# Altium footprint library WR-BHD.PcbLib: 220 footprints (part 4 of 14)
Each footprint in its own frame and in the unit in brackets; x right, y up, seen from the top. Pads: shape width x height; smd on the part's side, far side on the other; paste and mask are expansions set on the pad; w line width, h text height; cw(c..) or ccw(c..) is an arc to the next point about the centre after c.
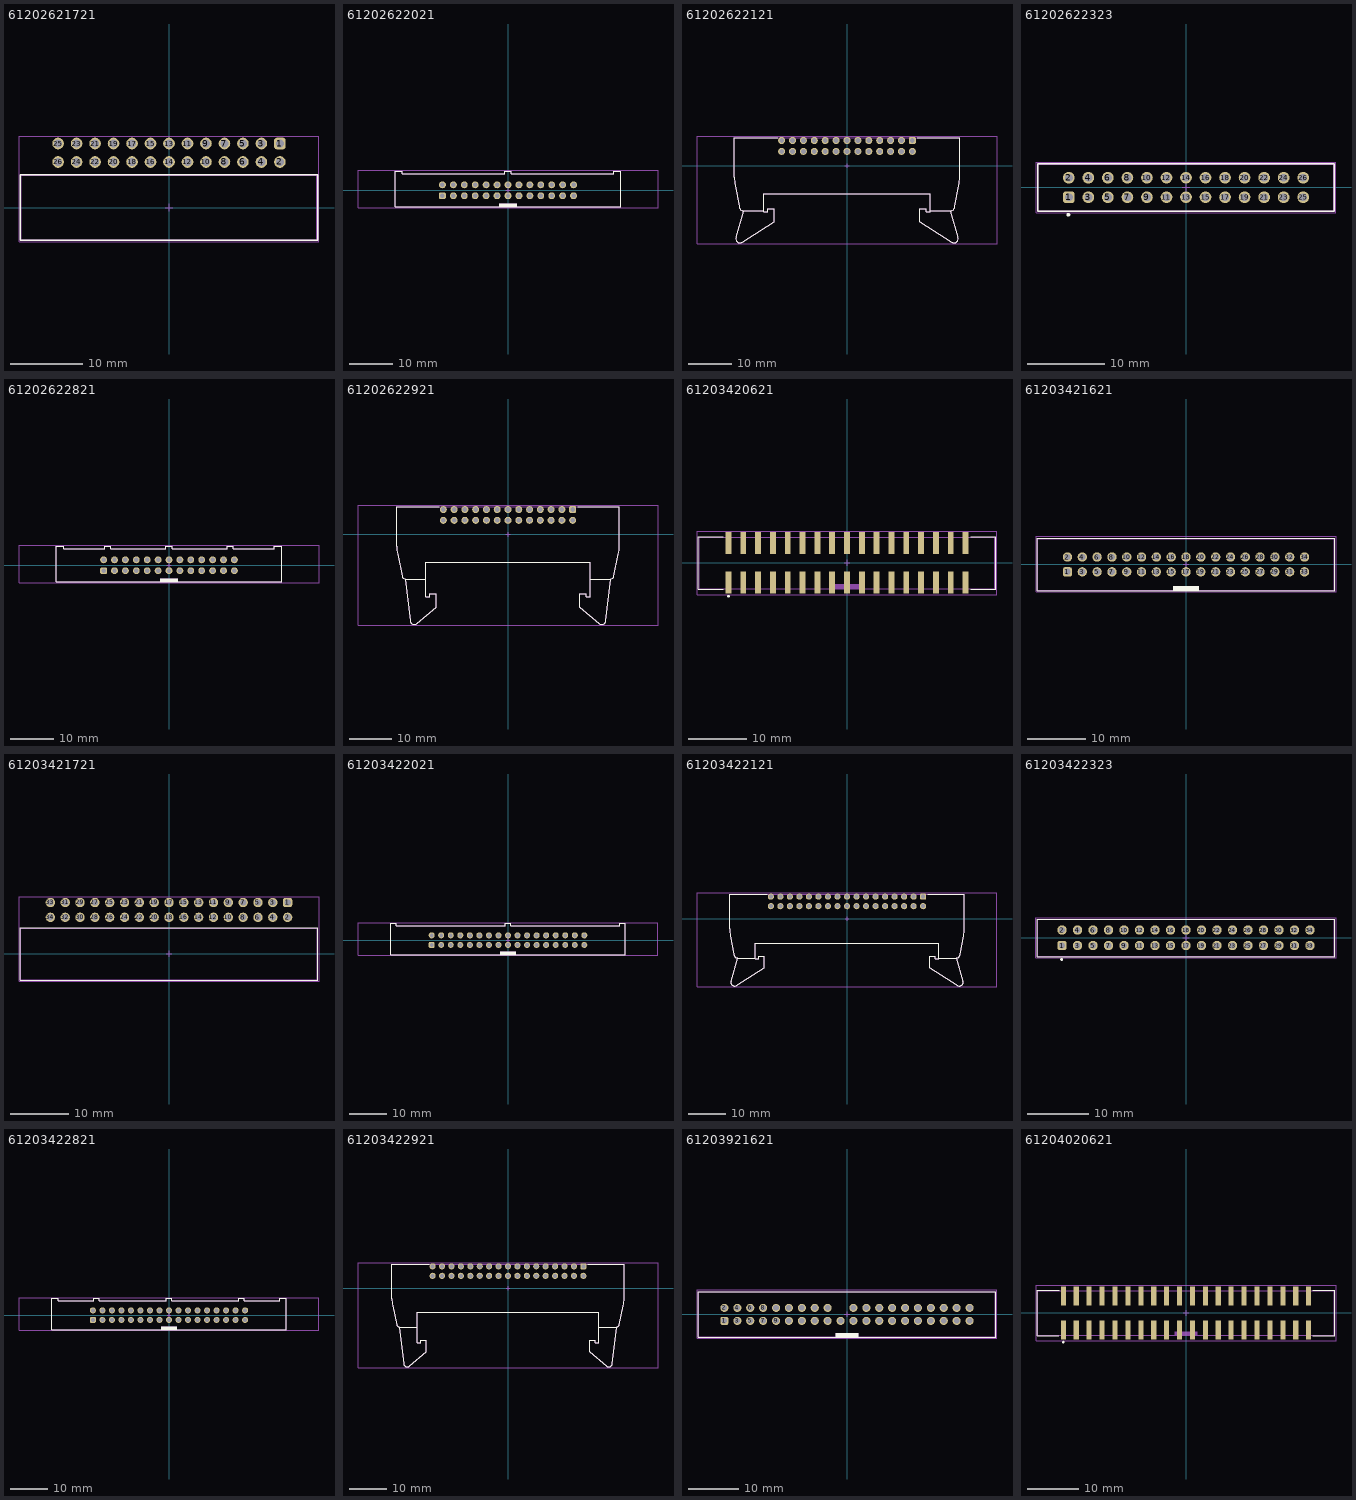
[diagram p3: the footprints below, top view; thin cyan lines are the x and y axes]

## 61202621721 [mm] "26 pins, right angled, gold plating"
height 9.1
pads (26):
  rrect50% 1.6x1.6 hole 1.1: 1(15.24,8.805)
  round 1.6 hole 1.1: 2(15.24,6.265) 3(12.7,8.805) 4(12.7,6.265) 5(10.16,8.805) 6(10.16,6.265) 7(7.62,8.805) 8(7.62,6.265) 9(5.08,8.805) 10(5.08,6.265) 11(2.54,8.805) 12(2.54,6.265) 13(0,8.805) 14(0,6.265) 15(-2.54,8.805) 16(-2.54,6.265) 17(-5.08,8.805) 18(-5.08,6.265) 19(-7.62,8.805) 20(-7.62,6.265) 21(-10.16,8.805) 22(-10.16,6.265) 23(-12.7,8.805) 24(-12.7,6.265) 25(-15.24,8.805) 26(-15.24,6.265)
Top Overlay:
  lines w0.2: -20.415,-4.5 20.415,-4.5 20.415,4.5 -20.415,4.5 -20.415,-4.5
Top Assembly:
  lines w0.1: -20.34,-4.425 20.34,-4.425 20.34,4.425 -20.34,4.425 -20.34,-4.425
Top Designator:
  text ".Designator" at -3.647,-0.357 h1
Top 3D Body:
  lines w0.1: -20.34,-4.425 -20.34,4.425 20.34,4.425 20.34,-4.425 -20.34,-4.425
Top Courtyard:
  lines w0.05: -20.615,-4.7 -20.615,9.805 20.615,9.805 20.615,-4.7 -20.615,-4.7
Top Component Center:
  lines w0.1: -0.5,0 0.5,0 ; 0,-0.5 0,0.5
3D body "61202621721.stp": height 9.23, standoff -2.88, extent -20.34,-4.425 20.34,9.125

## 61202622021 [mm] "26 pins, straight, short lever, gold plating"
height 24.5
pads (26):
  rrect50% 1.6x1.6 hole 1.02: 1(-15.24,-1.27)
  round 1.6 hole 1.02: 2(-15.24,1.27) 3(-12.7,-1.27) 4(-12.7,1.27) 5(-10.16,-1.27) 6(-10.16,1.27) 7(-7.62,-1.27) 8(-7.62,1.27) 9(-5.08,-1.27) 10(-5.08,1.27) 11(-2.54,-1.27) 12(-2.54,1.27) 13(0,-1.27) 14(0,1.27) 15(2.54,-1.27) 16(2.54,1.27) 17(5.08,-1.27) 18(5.08,1.27) 19(7.62,-1.27) 20(7.62,1.27) 21(10.16,-1.27) 22(10.16,1.27) 23(12.7,-1.27) 24(12.7,1.27) 25(15.24,-1.27) 26(15.24,1.27)
Top Overlay:
  rectangle: -2.1,-3.85 2.1,-3.05
  lines w0.2: -0.7,4.45 0.7,4.45 0.7,3.85 24.61,3.85 24.61,4.45 26.16,4.45 26.16,-3.85 -26.16,-3.85 -26.16,4.45 -24.61,4.45 -24.61,3.85 -0.7,3.85 -0.7,4.45 ; -0.7,4.45 -0.7,4.45
Top Assembly:
  rectangle: -2.1,-3.85 2.1,-3.05
  lines w0.1: -0.7,4.45 -0.7,3.85 -24.61,3.85 -24.61,4.45 -26.16,4.45 -26.16,-3.85 26.16,-3.85 26.16,4.45 24.61,4.45 24.61,3.85 0.7,3.85 0.7,4.45 -0.7,4.45 ; -0.7,4.45 -0.7,4.45
Top Designator:
  text ".Designator" at -3.647,-0.357 h1
Top 3D Body:
  rectangle: -2.1,-3.85 2.1,-3.05
  lines w0.1: -0.7,4.45 0.7,4.45 0.7,3.85 24.61,3.85 24.61,4.45 26.16,4.45 26.16,-3.85 -26.16,-3.85 -26.16,4.45 -24.61,4.45 -24.61,3.85 -0.7,3.85 -0.7,4.45 ; -0.7,4.45 -0.7,4.45
Top Courtyard:
  lines w0.05: -34.86,-4.05 -34.86,4.65 34.86,4.65 34.86,-4.05 -34.86,-4.05
Top Component Center:
  lines w0.1: -0.5,0 0.5,0 ; 0,-0.5 0,0.5
3D body "61202622021.stp": height 24.55, standoff -3.35, extent -26.259,-3.849 26.261,4.451

## 61202622121 [mm] "26 pins, right angeled, short lever, gold plating"
height 8.3
pads (26):
  rrect50% 1.65x1.65 hole 1.1: 1(15.24,5.88)
  round 1.65 hole 1.1: 2(15.24,3.34) 3(12.7,5.88) 4(12.7,3.34) 5(10.16,5.88) 6(10.16,3.34) 7(7.62,5.88) 8(7.62,3.34) 9(5.08,5.88) 10(5.08,3.34) 11(2.54,5.88) 12(2.54,3.34) 13(0,5.88) 14(0,3.34) 15(-2.54,5.88) 16(-2.54,3.34) 17(-5.08,5.88) 18(-5.08,3.34) 19(-7.62,5.88) 20(-7.62,3.34) 21(-10.16,5.88) 22(-10.16,3.34) 23(-12.7,5.88) 24(-12.7,3.34) 25(-15.24,5.88) 26(-15.24,3.34)
Top Overlay:
  lines w0.2: -25.124,-9.501 -26.066,-4.611 cw(c-16.26,-2.65) -26.26,-2.65 -26.26,6.5 -16.16,6.5 ; -25.12,-9.5 ccw(c-24.12,-9.5) -24.12,-10.5 ; -24.215,-10.5 -19.46,-10.5 ; -24.034,-10.601 -25.867,-16.691 ccw(c-24.91,-16.98) -24.36,-17.815 -16.96,-13.08 -16.96,-9.98 -18.46,-9.98 -18.46,-10.69 -19.46,-10.69 -19.46,-6.5 19.46,-6.5 19.46,-10.69 18.46,-10.69 18.46,-9.98 16.96,-9.98 16.96,-13.08 24.36,-17.816 ccw(c24.91,-16.98) 25.867,-16.691 24.034,-10.601 ; 16.41,6.5 26.26,6.5 26.26,-2.65 cw(c16.26,-2.65) 26.066,-4.611 25.124,-9.501 ; 19.46,-10.5 24.215,-10.5 ; 24.12,-10.5 ccw(c24.12,-9.5) 25.12,-9.5
Top Assembly:
  lines w0.1: -25.124,-9.501 -26.066,-4.611 cw(c-16.26,-2.65) -26.26,-2.65 -26.26,6.5 26.26,6.5 26.26,-2.65 cw(c16.26,-2.65) 26.066,-4.611 25.124,-9.501 ; -25.12,-9.5 ccw(c-24.12,-9.5) -24.12,-10.5 ; -24.215,-10.5 -19.46,-10.5 ; -24.034,-10.601 -25.867,-16.691 ccw(c-24.91,-16.98) -24.36,-17.815 -16.96,-13.08 -16.96,-9.98 -18.46,-9.98 -18.46,-10.69 -19.46,-10.69 -19.46,-6.5 19.46,-6.5 19.46,-10.69 18.46,-10.69 18.46,-9.98 16.96,-9.98 16.96,-13.08 24.36,-17.816 ccw(c24.91,-16.98) 25.867,-16.691 24.034,-10.601 ; 19.46,-10.5 24.215,-10.5 ; 24.12,-10.5 ccw(c24.12,-9.5) 25.12,-9.5
Top Designator:
  text ".Designator" at -3.647,-0.357 h1
Top 3D Body:
  lines w0.1: -25.124,-9.501 -26.066,-4.611 cw(c-16.26,-2.65) -26.26,-2.65 -26.26,6.5 26.26,6.5 26.26,-2.65 cw(c16.26,-2.65) 26.066,-4.611 25.124,-9.501 ; -25.12,-9.5 ccw(c-24.12,-9.5) -24.12,-10.5 ; -24.215,-10.5 -19.46,-10.5 ; -24.034,-10.601 -25.867,-16.691 ccw(c-24.91,-16.98) -24.36,-17.815 -16.96,-13.08 -16.96,-9.98 -18.46,-9.98 -18.46,-10.69 -19.46,-10.69 -19.46,-6.5 19.46,-6.5 19.46,-10.69 18.46,-10.69 18.46,-9.98 16.96,-9.98 16.96,-13.08 24.36,-17.816 ccw(c24.91,-16.98) 25.867,-16.691 24.034,-10.601 ; 19.46,-10.5 24.215,-10.5 ; 24.12,-10.5 ccw(c24.12,-9.5) 25.12,-9.5
Top Courtyard:
  lines w0.05: -34.96,-18.2 -34.96,6.88 34.96,6.88 34.96,-18.2 -34.96,-18.2
Top Component Center:
  lines w0.1: -0.5,0 0.5,0 ; 0,-0.5 0,0.5
3D body "61202622121.stp": height 8.35, standoff -3.35, extent -26.26,-18 26.26,6.5

## 61202622323 [mm] "26 pins, selective gold plating"
height 7.3
pads (26):
  rrect50% 1.52x1.52 hole 1.02: 1(-15.24,-1.27)
  round 1.52 hole 1.02: 2(-15.24,1.27) 3(-12.7,-1.27) 4(-12.7,1.27) 5(-10.16,-1.27) 6(-10.16,1.27) 7(-7.62,-1.27) 8(-7.62,1.27) 9(-5.08,-1.27) 10(-5.08,1.27) 11(-2.54,-1.27) 12(-2.54,1.27) 13(0,-1.27) 14(0,1.27) 15(2.54,-1.27) 16(2.54,1.27) 17(5.08,-1.27) 18(5.08,1.27) 19(7.62,-1.27) 20(7.62,1.27) 21(10.16,-1.27) 22(10.16,1.27) 23(12.7,-1.27) 24(12.7,1.27) 25(15.24,-1.27) 26(15.24,1.27)
Top Overlay:
  circle w0.25: c-15.3,-3.55 r0.125
  lines w0.2: -19.31,-3.075 19.31,-3.075 19.31,3.075 -19.31,3.075 -19.31,-3.075
Top Assembly:
  lines w0.1: -19.235,-3 -19.235,3 19.235,3 19.235,-3 -19.235,-3
Top Designator:
  text ".Designator" at -3.647,-0.357 h1
Top 3D Body:
  lines w0.1: -19.235,-3 19.235,-3 19.235,3 -19.235,3 -19.235,-3
Top Courtyard:
  lines w0.05: -19.51,-3.275 19.51,-3.275 19.51,3.275 -19.51,3.275 -19.51,-3.275
Top Component Center:
  lines w0.1: -0.5,0 0.5,0 ; 0,-0.5 0,0.5
3D body "61202622323.stp": height 9.33, standoff -3.27, extent -19.235,-3 19.235,3

## 61202622821 [mm] "26 pins, straight, long lever, gold plating"
height 28
pads (26):
  rrect50% 1.6x1.6 hole 1.02: 1(-15.24,-1.27)
  round 1.6 hole 1.02: 2(-15.24,1.27) 3(-12.7,-1.27) 4(-12.7,1.27) 5(-10.16,-1.27) 6(-10.16,1.27) 7(-7.62,-1.27) 8(-7.62,1.27) 9(-5.08,-1.27) 10(-5.08,1.27) 11(-2.54,-1.27) 12(-2.54,1.27) 13(0,-1.27) 14(0,1.27) 15(2.54,-1.27) 16(2.54,1.27) 17(5.08,-1.27) 18(5.08,1.27) 19(7.62,-1.27) 20(7.62,1.27) 21(10.16,-1.27) 22(10.16,1.27) 23(12.7,-1.27) 24(12.7,1.27) 25(15.24,-1.27) 26(15.24,1.27)
Top Overlay:
  rectangle: -2.1,-3.85 2.1,-3.04
  lines w0.2: -26.26,-3.85 26.26,-3.85 26.26,4.45 24.53,4.45 24.53,3.85 14.96,3.85 14.96,4.45 13.56,4.45 13.56,3.85 0.7,3.85 0.7,4.45 -0.7,4.45 -0.7,3.85 -13.56,3.85 -13.56,4.45 -14.96,4.45 -14.96,3.85 -24.53,3.85 -24.53,4.45 -26.26,4.45 -26.26,-3.85
Top Assembly:
  rectangle: -2.1,-3.85 2.1,-3.04
  lines w0.1: -26.26,-3.85 -26.26,4.45 -24.53,4.45 -24.53,3.85 -14.96,3.85 -14.96,4.45 -13.56,4.45 -13.56,3.85 -0.7,3.85 -0.7,4.45 0.7,4.45 0.7,3.85 13.56,3.85 13.56,4.45 14.96,4.45 14.96,3.85 24.53,3.85 24.53,4.45 26.26,4.45 26.26,-3.85 -26.26,-3.85
Top Designator:
  text ".Designator" at -3.647,-0.357 h1
Top 3D Body:
  rectangle: -2.1,-3.85 2.1,-3.04
  lines w0.1: -26.26,-3.85 26.26,-3.85 26.26,4.45 24.53,4.45 24.53,3.85 14.96,3.85 14.96,4.45 13.56,4.45 13.56,3.85 0.7,3.85 0.7,4.45 -0.7,4.45 -0.7,3.85 -13.56,3.85 -13.56,4.45 -14.96,4.45 -14.96,3.85 -24.53,3.85 -24.53,4.45 -26.26,4.45 -26.26,-3.85
Top Courtyard:
  lines w0.05: -34.96,-4.05 -34.96,4.65 34.96,4.65 34.96,-4.05 -34.96,-4.05
Top Component Center:
  lines w0.1: -0.5,0 0.5,0 ; 0,-0.5 0,0.5
3D body "61202622821 (rev1).stp": height 27.84, standoff -3.35, extent -26.26,-3.86 26.26,4.45

## 61202622921 [mm] "26 pins, right angeled, long lever, gold plating"
height 10.8
pads (26):
  rrect50% 1.65x1.65 hole 1.1: 1(15.24,5.88)
  round 1.65 hole 1.1: 2(15.24,3.34) 3(12.7,5.88) 4(12.7,3.34) 5(10.16,5.88) 6(10.16,3.34) 7(7.62,5.88) 8(7.62,3.34) 9(5.08,5.88) 10(5.08,3.34) 11(2.54,5.88) 12(2.54,3.34) 13(0,5.88) 14(0,3.34) 15(-2.54,5.88) 16(-2.54,3.34) 17(-5.08,5.88) 18(-5.08,3.34) 19(-7.62,5.88) 20(-7.62,3.34) 21(-10.16,5.88) 22(-10.16,3.34) 23(-12.7,5.88) 24(-12.7,3.34) 25(-15.24,5.88) 26(-15.24,3.34)
Top Overlay:
  lines w0.2: -26.26,-2.81 -26.26,6.5 -16.21,6.5 ; -26.256,-2.81 ccw(c-16.26,-2.51) -26.014,-4.714 -24.969,-9.884 ; -24.964,-9.883 ccw(c-24.04,-9.5) -24.04,-10.5 -19.36,-10.5 ; -24.224,-10.5 -23.078,-20.372 ccw(c-22.09,-20.22) -21.432,-20.973 -16.961,-17.109 ; -16.96,-17.11 -16.96,-14.01 -18.46,-14.01 -18.46,-14.72 -19.36,-14.72 -19.36,-6.5 19.36,-6.5 19.36,-14.72 18.46,-14.72 18.46,-14.01 16.96,-14.01 16.96,-17.11 ; 16.41,6.5 26.26,6.5 26.26,-2.81 ; 16.961,-17.109 21.432,-20.973 ccw(c22.09,-20.22) 23.078,-20.372 24.224,-10.5 ; 19.36,-10.5 24.04,-10.5 ccw(c24.04,-9.5) 24.964,-9.883 ; 24.969,-9.884 26.014,-4.714 ccw(c16.26,-2.51) 26.256,-2.81
Top Assembly:
  lines w0.1: -26.26,-2.81 -26.26,6.5 26.26,6.5 26.26,-2.81 ; -26.256,-2.81 ccw(c-16.26,-2.51) -26.014,-4.714 -24.969,-9.884 ; -24.964,-9.883 ccw(c-24.04,-9.5) -24.04,-10.5 -19.36,-10.5 ; -24.224,-10.5 -23.078,-20.372 ccw(c-22.09,-20.22) -21.432,-20.973 -16.961,-17.109 ; -16.96,-17.11 -16.96,-14.01 -18.46,-14.01 -18.46,-14.72 -19.36,-14.72 -19.36,-6.5 19.36,-6.5 19.36,-14.72 18.46,-14.72 18.46,-14.01 16.96,-14.01 16.96,-17.11 ; 16.961,-17.109 21.432,-20.973 ccw(c22.09,-20.22) 23.078,-20.372 24.224,-10.5 ; 19.36,-10.5 24.04,-10.5 ccw(c24.04,-9.5) 24.964,-9.883 ; 24.969,-9.884 26.014,-4.714 ccw(c16.26,-2.51) 26.256,-2.81
Top Designator:
  text ".Designator" at -3.647,-0.357 h1
Top 3D Body:
  lines w0.1: -26.26,-2.81 -26.26,6.5 26.26,6.5 26.26,-2.81 ; -26.256,-2.81 ccw(c-16.26,-2.51) -26.014,-4.714 -24.969,-9.884 ; -24.964,-9.883 ccw(c-24.04,-9.5) -24.04,-10.5 -19.36,-10.5 ; -24.224,-10.5 -23.078,-20.372 ccw(c-22.09,-20.22) -21.432,-20.973 -16.961,-17.109 ; -16.96,-17.11 -16.96,-14.01 -18.46,-14.01 -18.46,-14.72 -19.36,-14.72 -19.36,-6.5 19.36,-6.5 19.36,-14.72 18.46,-14.72 18.46,-14.01 16.96,-14.01 16.96,-17.11 ; 16.961,-17.109 21.432,-20.973 ccw(c22.09,-20.22) 23.078,-20.372 24.224,-10.5 ; 19.36,-10.5 24.04,-10.5 ccw(c24.04,-9.5) 24.964,-9.883 ; 24.969,-9.884 26.014,-4.714 ccw(c16.26,-2.51) 26.256,-2.81
Top Courtyard:
  lines w0.05: -35.36,-21.41 -35.36,6.88 35.36,6.88 35.36,-21.41 -35.36,-21.41
Top Component Center:
  lines w0.1: -0.5,0 0.5,0 ; 0,-0.5 0,0.5
3D body "61202622921 (rev1).stp": height 8.35, standoff -2.35, extent -26.26,-21.221 26.26,6.5

## 61203420621 [mm] "34 pins, SMT, straight, gold plating"
height 9.2
pads (34):
  rect 1x3.75 smd: 1(-20.32,-3.375) 2(-20.32,3.375) 3(-17.78,-3.375) 4(-17.78,3.375) 5(-15.24,-3.375) 6(-15.24,3.375) 7(-12.7,-3.375) 8(-12.7,3.375) 9(-10.16,-3.375) 10(-10.16,3.375) 11(-7.62,-3.375) 12(-7.62,3.375) 13(-5.08,-3.375) 14(-5.08,3.375) 15(-2.54,-3.375) 16(-2.54,3.375) 17(0,-3.375) 18(0,3.375) 19(2.54,-3.375) 20(2.54,3.375) 21(5.08,-3.375) 22(5.08,3.375) 23(7.62,-3.375) 24(7.62,3.375) 25(10.16,-3.375) 26(10.16,3.375) 27(12.7,-3.375) 28(12.7,3.375) 29(15.24,-3.375) 30(15.24,3.375) 31(17.78,-3.375) 32(17.78,3.375) 33(20.32,-3.375) 34(20.32,3.375)
Top Overlay:
  circle w0.25: c-20.32,-5.725 r0.125
  lines w0.2: -21.21,-4.5 -25.49,-4.5 -25.49,4.5 -21.16,4.5 ; 21.16,-4.5 25.49,-4.5 25.49,4.5 21.16,4.5
Top Assembly:
  rectangle: -2.25,-4.4 2.25,-3.6
  lines w0.1: -25.34,-4.4 -25.34,4.4 25.34,4.4 25.34,-4.4 -25.34,-4.4
Top Designator:
  text ".Designator" at -3.647,-0.357 h1
Top 3D Body:
  rectangle: -2.25,-4.4 2.25,-3.6
  lines w0.1: -25.34,-4.4 25.34,-4.4 25.34,4.4 -25.34,4.4 -25.34,-4.4
Top Courtyard:
  lines w0.05: -25.69,-5.45 25.69,-5.45 25.69,5.45 -25.69,5.45 -25.69,-5.45
Top Component Center:
  lines w0.1: -0.5,0 0.5,0 ; 0,-0.5 0,0.5
3D body "61203420621.stp": height 10.2, standoff 0.01, extent -25.4,-4.75 25.4,4.75

## 61203421621 [mm] "34 pins, straight, gold plating"
height 9.1
pads (34):
  rrect50% 1.6x1.6 hole 1.1: 1(-20.32,-1.27)
  round 1.6 hole 1.1: 2(-20.32,1.27) 3(-17.78,-1.27) 4(-17.78,1.27) 5(-15.24,-1.27) 6(-15.24,1.27) 7(-12.7,-1.27) 8(-12.7,1.27) 9(-10.16,-1.27) 10(-10.16,1.27) 11(-7.62,-1.27) 12(-7.62,1.27) 13(-5.08,-1.27) 14(-5.08,1.27) 15(-2.54,-1.27) 16(-2.54,1.27) 17(0,-1.27) 18(0,1.27) 19(2.54,-1.27) 20(2.54,1.27) 21(5.08,-1.27) 22(5.08,1.27) 23(7.62,-1.27) 24(7.62,1.27) 25(10.16,-1.27) 26(10.16,1.27) 27(12.7,-1.27) 28(12.7,1.27) 29(15.24,-1.27) 30(15.24,1.27) 31(17.78,-1.27) 32(17.78,1.27) 33(20.32,-1.27) 34(20.32,1.27)
Top Overlay:
  rectangle: -2.25,-4.5 2.25,-3.7
  lines w0.2: -25.52,-4.5 -25.52,4.5 25.52,4.5 25.52,-4.5 -25.52,-4.5
Top Assembly:
  rectangle: -2.25,-4.425 2.25,-3.7
  lines w0.1: -25.42,-4.425 25.42,-4.425 25.42,4.425 -25.42,4.425 -25.42,-4.425
Top Designator:
  text ".Designator" at -3.647,-0.357 h1
Top 3D Body:
  rectangle: -2.25,-4.425 2.25,-3.7
  lines w0.1: -25.42,-4.425 -25.42,4.425 25.42,4.425 25.42,-4.425 -25.42,-4.425
Top Courtyard:
  lines w0.05: -25.72,-4.7 -25.72,4.85 25.72,4.85 25.72,-4.7 -25.72,-4.7
Top Component Center:
  lines w0.1: -0.5,0 0.5,0 ; 0,-0.5 0,0.5
3D body "61203421621.stp": height 9.13, standoff -2.98, extent -25.42,-4.425 25.42,4.75

## 61203421721 [mm] "34 pins, right angled, gold plating"
height 9.1
pads (34):
  rrect50% 1.6x1.6 hole 1.1: 1(20.32,8.805)
  round 1.6 hole 1.1: 2(20.32,6.265) 3(17.78,8.805) 4(17.78,6.265) 5(15.24,8.805) 6(15.24,6.265) 7(12.7,8.805) 8(12.7,6.265) 9(10.16,8.805) 10(10.16,6.265) 11(7.62,8.805) 12(7.62,6.265) 13(5.08,8.805) 14(5.08,6.265) 15(2.54,8.805) 16(2.54,6.265) 17(0,8.805) 18(0,6.265) 19(-2.54,8.805) 20(-2.54,6.265) 21(-5.08,8.805) 22(-5.08,6.265) 23(-7.62,8.805) 24(-7.62,6.265) 25(-10.16,8.805) 26(-10.16,6.265) 27(-12.7,8.805) 28(-12.7,6.265) 29(-15.24,8.805) 30(-15.24,6.265) 31(-17.78,8.805) 32(-17.78,6.265) 33(-20.32,8.805) 34(-20.32,6.265)
Top Overlay:
  lines w0.2: -25.495,-4.5 -25.495,4.5 25.495,4.5 25.495,-4.5 -25.495,-4.5
Top Assembly:
  lines w0.1: -25.42,-4.425 -25.42,4.425 25.42,4.425 25.42,-4.425 -25.42,-4.425
Top Designator:
  text ".Designator" at -3.647,-0.357 h1
Top 3D Body:
  lines w0.1: -25.42,-4.425 25.42,-4.425 25.42,4.425 -25.42,4.425 -25.42,-4.425
Top Courtyard:
  lines w0.05: -25.695,-4.7 25.695,-4.7 25.695,9.805 -25.695,9.805 -25.695,-4.7
Top Component Center:
  lines w0.1: -0.5,0 0.5,0 ; 0,-0.5 0,0.5
3D body "61203421721.stp": height 9.23, standoff -2.88, extent -25.42,-4.425 25.42,9.125

## 61203422021 [mm] "34 pins, straight, short lever, gold plating"
height 24.5
pads (34):
  rrect50% 1.6x1.6 hole 1.02: 1(-20.32,-1.27)
  round 1.6 hole 1.02: 2(-20.32,1.27) 3(-17.78,-1.27) 4(-17.78,1.27) 5(-15.24,-1.27) 6(-15.24,1.27) 7(-12.7,-1.27) 8(-12.7,1.27) 9(-10.16,-1.27) 10(-10.16,1.27) 11(-7.62,-1.27) 12(-7.62,1.27) 13(-5.08,-1.27) 14(-5.08,1.27) 15(-2.54,-1.27) 16(-2.54,1.27) 17(0,-1.27) 18(0,1.27) 19(2.54,-1.27) 20(2.54,1.27) 21(5.08,-1.27) 22(5.08,1.27) 23(7.62,-1.27) 24(7.62,1.27) 25(10.16,-1.27) 26(10.16,1.27) 27(12.7,-1.27) 28(12.7,1.27) 29(15.24,-1.27) 30(15.24,1.27) 31(17.78,-1.27) 32(17.78,1.27) 33(20.32,-1.27) 34(20.32,1.27)
Top Overlay:
  rectangle: -2.1,-3.85 2.1,-3.05
  lines w0.2: -0.7,4.45 0.7,4.45 0.7,3.85 29.69,3.85 29.69,4.45 31.24,4.45 31.24,-3.85 -31.24,-3.85 -31.24,4.45 -29.69,4.45 -29.69,3.85 -0.7,3.85 -0.7,4.45 ; -0.7,4.45 -0.7,4.45
Top Assembly:
  rectangle: -2.1,-3.85 2.1,-3.05
  lines w0.1: -0.7,4.45 -0.7,3.85 -29.69,3.85 -29.69,4.45 -31.24,4.45 -31.24,-3.85 31.24,-3.85 31.24,4.45 29.69,4.45 29.69,3.85 0.7,3.85 0.7,4.45 -0.7,4.45 ; -0.7,4.45 -0.7,4.45
Top Designator:
  text ".Designator" at -3.647,-0.357 h1
Top 3D Body:
  rectangle: -2.1,-3.85 2.1,-3.05
  lines w0.1: -0.7,4.45 0.7,4.45 0.7,3.85 29.69,3.85 29.69,4.45 31.24,4.45 31.24,-3.85 -31.24,-3.85 -31.24,4.45 -29.69,4.45 -29.69,3.85 -0.7,3.85 -0.7,4.45 ; -0.7,4.45 -0.7,4.45
Top Courtyard:
  lines w0.05: -39.94,-4.05 -39.94,4.65 39.94,4.65 39.94,-4.05 -39.94,-4.05
Top Component Center:
  lines w0.1: -0.5,0 0.5,0 ; 0,-0.5 0,0.5
3D body "61203422021.stp": height 24.55, standoff -3.35, extent -31.34,-3.85 31.34,4.45

## 61203422121 [mm] "34 pins, right angeled, short lever, gold plating"
height 8.3
pads (34):
  rrect50% 1.65x1.65 hole 1.1: 1(20.32,5.88)
  round 1.65 hole 1.1: 2(20.32,3.34) 3(17.78,5.88) 4(17.78,3.34) 5(15.24,5.88) 6(15.24,3.34) 7(12.7,5.88) 8(12.7,3.34) 9(10.16,5.88) 10(10.16,3.34) 11(7.62,5.88) 12(7.62,3.34) 13(5.08,5.88) 14(5.08,3.34) 15(2.54,5.88) 16(2.54,3.34) 17(0,5.88) 18(0,3.34) 19(-2.54,5.88) 20(-2.54,3.34) 21(-5.08,5.88) 22(-5.08,3.34) 23(-7.62,5.88) 24(-7.62,3.34) 25(-10.16,5.88) 26(-10.16,3.34) 27(-12.7,5.88) 28(-12.7,3.34) 29(-15.24,5.88) 30(-15.24,3.34) 31(-17.78,5.88) 32(-17.78,3.34) 33(-20.32,5.88) 34(-20.32,3.34)
Top Overlay:
  lines w0.2: -30.204,-9.501 -31.146,-4.611 cw(c-21.34,-2.65) -31.34,-2.65 -31.34,6.5 -21.24,6.5 ; -30.2,-9.5 ccw(c-29.2,-9.5) -29.2,-10.5 ; -29.295,-10.5 -24.54,-10.5 ; -29.114,-10.601 -30.947,-16.691 ccw(c-29.99,-16.98) -29.44,-17.815 -22.04,-13.08 -22.04,-9.98 -23.54,-9.98 -23.54,-10.69 -24.54,-10.69 -24.54,-6.5 24.54,-6.5 24.54,-10.69 23.54,-10.69 23.54,-9.98 22.04,-9.98 22.04,-13.08 29.44,-17.816 ccw(c29.99,-16.98) 30.947,-16.691 29.114,-10.601 ; 21.49,6.5 31.34,6.5 31.34,-2.65 cw(c21.34,-2.65) 31.146,-4.611 30.204,-9.501 ; 24.54,-10.5 29.295,-10.5 ; 29.2,-10.5 ccw(c29.2,-9.5) 30.2,-9.5
Top Assembly:
  lines w0.1: -30.204,-9.501 -31.146,-4.611 cw(c-21.34,-2.65) -31.34,-2.65 -31.34,6.5 31.34,6.5 31.34,-2.65 cw(c21.34,-2.65) 31.146,-4.611 30.204,-9.501 ; -30.2,-9.5 ccw(c-29.2,-9.5) -29.2,-10.5 ; -29.295,-10.5 -24.54,-10.5 ; -29.114,-10.601 -30.947,-16.691 ccw(c-29.99,-16.98) -29.44,-17.815 -22.04,-13.08 -22.04,-9.98 -23.54,-9.98 -23.54,-10.69 -24.54,-10.69 -24.54,-6.5 24.54,-6.5 24.54,-10.69 23.54,-10.69 23.54,-9.98 22.04,-9.98 22.04,-13.08 29.44,-17.816 ccw(c29.99,-16.98) 30.947,-16.691 29.114,-10.601 ; 24.54,-10.5 29.295,-10.5 ; 29.2,-10.5 ccw(c29.2,-9.5) 30.2,-9.5
Top Designator:
  text ".Designator" at -3.647,-0.357 h1
Top 3D Body:
  lines w0.1: -30.204,-9.501 -31.146,-4.611 cw(c-21.34,-2.65) -31.34,-2.65 -31.34,6.5 31.34,6.5 31.34,-2.65 cw(c21.34,-2.65) 31.146,-4.611 30.204,-9.501 ; -30.2,-9.5 ccw(c-29.2,-9.5) -29.2,-10.5 ; -29.295,-10.5 -24.54,-10.5 ; -29.114,-10.601 -30.947,-16.691 ccw(c-29.99,-16.98) -29.44,-17.815 -22.04,-13.08 -22.04,-9.98 -23.54,-9.98 -23.54,-10.69 -24.54,-10.69 -24.54,-6.5 24.54,-6.5 24.54,-10.69 23.54,-10.69 23.54,-9.98 22.04,-9.98 22.04,-13.08 29.44,-17.816 ccw(c29.99,-16.98) 30.947,-16.691 29.114,-10.601 ; 24.54,-10.5 29.295,-10.5 ; 29.2,-10.5 ccw(c29.2,-9.5) 30.2,-9.5
Top Courtyard:
  lines w0.05: -40.04,-18.2 -40.04,6.88 40.04,6.88 40.04,-18.2 -40.04,-18.2
Top Component Center:
  lines w0.1: -0.5,0 0.5,0 ; 0,-0.5 0,0.5
3D body "61203422121.stp": height 8.35, standoff -3.35, extent -31.34,-18 31.34,6.5

## 61203422323 [mm] "34 pins, selective gold plating"
height 7.3
pads (34):
  rrect50% 1.52x1.52 hole 1.02: 1(-20.32,-1.27)
  round 1.52 hole 1.02: 2(-20.32,1.27) 3(-17.78,-1.27) 4(-17.78,1.27) 5(-15.24,-1.27) 6(-15.24,1.27) 7(-12.7,-1.27) 8(-12.7,1.27) 9(-10.16,-1.27) 10(-10.16,1.27) 11(-7.62,-1.27) 12(-7.62,1.27) 13(-5.08,-1.27) 14(-5.08,1.27) 15(-2.54,-1.27) 16(-2.54,1.27) 17(0,-1.27) 18(0,1.27) 19(2.54,-1.27) 20(2.54,1.27) 21(5.08,-1.27) 22(5.08,1.27) 23(7.62,-1.27) 24(7.62,1.27) 25(10.16,-1.27) 26(10.16,1.27) 27(12.7,-1.27) 28(12.7,1.27) 29(15.24,-1.27) 30(15.24,1.27) 31(17.78,-1.27) 32(17.78,1.27) 33(20.32,-1.27) 34(20.32,1.27)
Top Overlay:
  circle w0.25: c-20.38,-3.55 r0.125
  lines w0.2: -24.39,-3.075 -24.39,3.075 24.39,3.075 24.39,-3.075 -24.39,-3.075
Top Assembly:
  lines w0.1: -24.315,-3 24.315,-3 24.315,3 -24.315,3 -24.315,-3
Top Designator:
  text ".Designator" at -3.647,-0.357 h1
Top 3D Body:
  lines w0.1: -24.315,-3 -24.315,3 24.315,3 24.315,-3 -24.315,-3
Top Courtyard:
  lines w0.05: -24.59,-3.275 -24.59,3.275 24.59,3.275 24.59,-3.275 -24.59,-3.275
Top Component Center:
  lines w0.1: -0.5,0 0.5,0 ; 0,-0.5 0,0.5
3D body "61203422323.stp": height 9.33, standoff -3.27, extent -24.315,-3 24.315,3

## 61203422821 [mm] "34 pins, straight, long lever, gold plating"
height 28
pads (34):
  rrect50% 1.6x1.6 hole 1.02: 1(-20.32,-1.27)
  round 1.6 hole 1.02: 2(-20.32,1.27) 3(-17.78,-1.27) 4(-17.78,1.27) 5(-15.24,-1.27) 6(-15.24,1.27) 7(-12.7,-1.27) 8(-12.7,1.27) 9(-10.16,-1.27) 10(-10.16,1.27) 11(-7.62,-1.27) 12(-7.62,1.27) 13(-5.08,-1.27) 14(-5.08,1.27) 15(-2.54,-1.27) 16(-2.54,1.27) 17(0,-1.27) 18(0,1.27) 19(2.54,-1.27) 20(2.54,1.27) 21(5.08,-1.27) 22(5.08,1.27) 23(7.62,-1.27) 24(7.62,1.27) 25(10.16,-1.27) 26(10.16,1.27) 27(12.7,-1.27) 28(12.7,1.27) 29(15.24,-1.27) 30(15.24,1.27) 31(17.78,-1.27) 32(17.78,1.27) 33(20.32,-1.27) 34(20.32,1.27)
Top Overlay:
  rectangle: -2.1,-3.85 2.1,-3.04
  lines w0.2: -31.34,-3.85 -31.34,4.45 -29.61,4.45 -29.61,3.85 -20.04,3.85 -20.04,4.45 -18.64,4.45 -18.64,3.85 -0.7,3.85 -0.7,4.45 0.7,4.45 0.7,3.85 18.64,3.85 18.64,4.45 20.04,4.45 20.04,3.85 29.61,3.85 29.61,4.45 31.34,4.45 31.34,-3.85 -31.34,-3.85
Top Assembly:
  rectangle: -2.1,-3.85 2.1,-3.04
  lines w0.1: -31.34,-3.85 31.34,-3.85 31.34,4.45 29.61,4.45 29.61,3.85 20.04,3.85 20.04,4.45 18.64,4.45 18.64,3.85 0.7,3.85 0.7,4.45 -0.7,4.45 -0.7,3.85 -18.64,3.85 -18.64,4.45 -20.04,4.45 -20.04,3.85 -29.61,3.85 -29.61,4.45 -31.34,4.45 -31.34,-3.85
Top Designator:
  text ".Designator" at -3.647,-0.357 h1
Top 3D Body:
  rectangle: -2.1,-3.85 2.1,-3.04
  lines w0.1: -31.34,-3.85 -31.34,4.45 -29.61,4.45 -29.61,3.85 -20.04,3.85 -20.04,4.45 -18.64,4.45 -18.64,3.85 -0.7,3.85 -0.7,4.45 0.7,4.45 0.7,3.85 18.64,3.85 18.64,4.45 20.04,4.45 20.04,3.85 29.61,3.85 29.61,4.45 31.34,4.45 31.34,-3.85 -31.34,-3.85
Top Courtyard:
  lines w0.05: -40.04,-4.05 -40.04,4.65 40.04,4.65 40.04,-4.05 -40.04,-4.05
Top Component Center:
  lines w0.1: -0.5,0 0.5,0 ; 0,-0.5 0,0.5
3D body "61203422821 (rev1).stp": height 27.84, standoff -3.35, extent -31.34,-3.86 31.34,4.45

## 61203422921 [mm] "34 pins, right angeled, long lever, gold plating"
height 10.8
pads (34):
  rrect50% 1.65x1.65 hole 1.1: 1(20.32,5.88)
  round 1.65 hole 1.1: 2(20.32,3.34) 3(17.78,5.88) 4(17.78,3.34) 5(15.24,5.88) 6(15.24,3.34) 7(12.7,5.88) 8(12.7,3.34) 9(10.16,5.88) 10(10.16,3.34) 11(7.62,5.88) 12(7.62,3.34) 13(5.08,5.88) 14(5.08,3.34) 15(2.54,5.88) 16(2.54,3.34) 17(0,5.88) 18(0,3.34) 19(-2.54,5.88) 20(-2.54,3.34) 21(-5.08,5.88) 22(-5.08,3.34) 23(-7.62,5.88) 24(-7.62,3.34) 25(-10.16,5.88) 26(-10.16,3.34) 27(-12.7,5.88) 28(-12.7,3.34) 29(-15.24,5.88) 30(-15.24,3.34) 31(-17.78,5.88) 32(-17.78,3.34) 33(-20.32,5.88) 34(-20.32,3.34)
Top Overlay:
  lines w0.2: -31.34,-2.81 -31.34,6.5 -21.29,6.5 ; -31.336,-2.81 ccw(c-21.34,-2.51) -31.094,-4.714 -30.049,-9.884 ; -30.044,-9.883 ccw(c-29.12,-9.5) -29.12,-10.5 -24.44,-10.5 ; -29.304,-10.5 -28.158,-20.372 ccw(c-27.17,-20.22) -26.512,-20.973 -22.041,-17.109 ; -22.04,-17.11 -22.04,-14.01 -23.54,-14.01 -23.54,-14.72 -24.44,-14.72 -24.44,-6.5 24.44,-6.5 24.44,-14.72 23.54,-14.72 23.54,-14.01 22.04,-14.01 22.04,-17.11 ; 21.49,6.5 31.34,6.5 31.34,-2.81 ; 22.041,-17.109 26.512,-20.973 ccw(c27.17,-20.22) 28.158,-20.372 29.304,-10.5 ; 24.44,-10.5 29.12,-10.5 ccw(c29.12,-9.5) 30.044,-9.883 ; 30.049,-9.884 31.094,-4.714 ccw(c21.34,-2.51) 31.336,-2.81
Top Assembly:
  lines w0.1: -31.34,-2.81 -31.34,6.5 31.34,6.5 31.34,-2.81 ; -31.336,-2.81 ccw(c-21.34,-2.51) -31.094,-4.714 -30.049,-9.884 ; -30.044,-9.883 ccw(c-29.12,-9.5) -29.12,-10.5 -24.44,-10.5 ; -29.304,-10.5 -28.158,-20.372 ccw(c-27.17,-20.22) -26.512,-20.973 -22.041,-17.109 ; -22.04,-17.11 -22.04,-14.01 -23.54,-14.01 -23.54,-14.72 -24.44,-14.72 -24.44,-6.5 24.44,-6.5 24.44,-14.72 23.54,-14.72 23.54,-14.01 22.04,-14.01 22.04,-17.11 ; 22.041,-17.109 26.512,-20.973 ccw(c27.17,-20.22) 28.158,-20.372 29.304,-10.5 ; 24.44,-10.5 29.12,-10.5 ccw(c29.12,-9.5) 30.044,-9.883 ; 30.049,-9.884 31.094,-4.714 ccw(c21.34,-2.51) 31.336,-2.81
Top Designator:
  text ".Designator" at -3.647,-0.357 h1
Top 3D Body:
  lines w0.1: -31.34,-2.81 -31.34,6.5 31.34,6.5 31.34,-2.81 ; -31.336,-2.81 ccw(c-21.34,-2.51) -31.094,-4.714 -30.049,-9.884 ; -30.044,-9.883 ccw(c-29.12,-9.5) -29.12,-10.5 -24.44,-10.5 ; -29.304,-10.5 -28.158,-20.372 ccw(c-27.17,-20.22) -26.512,-20.973 -22.041,-17.109 ; -22.04,-17.11 -22.04,-14.01 -23.54,-14.01 -23.54,-14.72 -24.44,-14.72 -24.44,-6.5 24.44,-6.5 24.44,-14.72 23.54,-14.72 23.54,-14.01 22.04,-14.01 22.04,-17.11 ; 22.041,-17.109 26.512,-20.973 ccw(c27.17,-20.22) 28.158,-20.372 29.304,-10.5 ; 24.44,-10.5 29.12,-10.5 ccw(c29.12,-9.5) 30.044,-9.883 ; 30.049,-9.884 31.094,-4.714 ccw(c21.34,-2.51) 31.336,-2.81
Top Courtyard:
  lines w0.05: -40.44,-21.41 -40.44,6.88 40.44,6.88 40.44,-21.41 -40.44,-21.41
Top Component Center:
  lines w0.1: -0.5,0 0.5,0 ; 0,-0.5 0,0.5
3D body "61203422921 (rev1).stp": height 8.35, standoff -2.35, extent -31.34,-21.221 31.34,6.5

## 61203921621 [mm] "39 pins, straight, gold plating"
height 9.1
pads (39):
  rrect50% 1.6x1.6 hole 1.1: 1(-24.13,-1.27)
  round 1.6 hole 1.1: 2(-24.13,1.27) 3(-21.59,-1.27) 4(-21.59,1.27) 5(-19.05,-1.27) 6(-19.05,1.27) 7(-16.51,-1.27) 8(-16.51,1.27) 9(-13.97,-1.27) 10(-13.97,1.27) 11(-11.43,-1.27) 12(-11.43,1.27) 13(-8.89,-1.27) 14(-8.89,1.27) 15(-6.35,-1.27) 16(-6.35,1.27) 17(-3.81,-1.27) 18(-3.81,1.27) 19(-1.27,-1.27) 21(1.27,-1.27) 22(1.27,1.27) 23(3.81,-1.27) 24(3.81,1.27) 25(6.35,-1.27) 26(6.35,1.27) 27(8.89,-1.27) 28(8.89,1.27) 29(11.43,-1.27) 30(11.43,1.27) 31(13.97,-1.27) 32(13.97,1.27) 33(16.51,-1.27) 34(16.51,1.27) 35(19.05,-1.27) 36(19.05,1.27) 37(21.59,-1.27) 38(21.59,1.27) 39(24.13,-1.27) 40(24.13,1.27)
Top Overlay:
  rectangle: -2.25,-4.5 2.25,-3.7
  lines w0.2: -29.33,-4.5 29.33,-4.5 29.33,4.5 -29.33,4.5 -29.33,-4.5
Top Assembly:
  rectangle: -2.25,-4.425 2.25,-3.7
  lines w0.1: -29.23,-4.425 -29.23,4.425 29.23,4.425 29.23,-4.425 -29.23,-4.425
Top Designator:
  text ".Designator" at -3.647,-0.357 h1
Top 3D Body:
  rectangle: -2.25,-4.425 2.25,-3.7
  lines w0.1: -29.23,-4.425 29.23,-4.425 29.23,4.425 -29.23,4.425 -29.23,-4.425
Top Courtyard:
  lines w0.05: -29.53,-4.7 29.53,-4.7 29.53,4.85 -29.53,4.85 -29.53,-4.7
Top Component Center:
  lines w0.1: -0.5,0 0.5,0 ; 0,-0.5 0,0.5
3D body "61203921621.stp": height 9.13, standoff -2.98, extent -29.23,-4.425 29.23,4.75

## 61204020621 [mm] "40 pins, SMT, straight, gold plating"
height 9.2
pads (40):
  rect 1x3.75 smd: 1(-24.13,-3.375) 2(-24.13,3.375) 3(-21.59,-3.375) 4(-21.59,3.375) 5(-19.05,-3.375) 6(-19.05,3.375) 7(-16.51,-3.375) 8(-16.51,3.375) 9(-13.97,-3.375) 10(-13.97,3.375) 11(-11.43,-3.375) 12(-11.43,3.375) 13(-8.89,-3.375) 14(-8.89,3.375) 15(-6.35,-3.375) 16(-6.35,3.375) 17(-3.81,-3.375) 18(-3.81,3.375) 19(-1.27,-3.375) 20(-1.27,3.375) 21(1.27,-3.375) 22(1.27,3.375) 23(3.81,-3.375) 24(3.81,3.375) 25(6.35,-3.375) 26(6.35,3.375) 27(8.89,-3.375) 28(8.89,3.375) 29(11.43,-3.375) 30(11.43,3.375) 31(13.97,-3.375) 32(13.97,3.375) 33(16.51,-3.375) 34(16.51,3.375) 35(19.05,-3.375) 36(19.05,3.375) 37(21.59,-3.375) 38(21.59,3.375) 39(24.13,-3.375) 40(24.13,3.375)
Top Overlay:
  circle w0.25: c-24.13,-5.725 r0.125
  lines w0.2: -25.02,-4.5 -29.3,-4.5 -29.3,4.5 -24.97,4.5 ; 24.97,-4.5 29.3,-4.5 29.3,4.5 24.97,4.5
Top Assembly:
  rectangle: -2.25,-4.4 2.25,-3.6
  lines w0.1: -29.15,-4.4 -29.15,4.4 29.15,4.4 29.15,-4.4 -29.15,-4.4
Top Designator:
  text ".Designator" at -3.647,-0.357 h1
Top 3D Body:
  rectangle: -2.25,-4.4 2.25,-3.6
  lines w0.1: -29.15,-4.4 29.15,-4.4 29.15,4.4 -29.15,4.4 -29.15,-4.4
Top Courtyard:
  lines w0.05: -29.5,-5.45 29.5,-5.45 29.5,5.45 -29.5,5.45 -29.5,-5.45
Top Component Center:
  lines w0.1: -0.5,0 0.5,0 ; 0,-0.5 0,0.5
3D body "61204020621.stp": height 10.2, standoff 0.01, extent -29.21,-4.75 29.21,4.75